# Altium schematic symbol library BQ24040DSQR.SchLib: 1 symbol
Pins are listed as number, name and electrical type; pins without a type are passive.

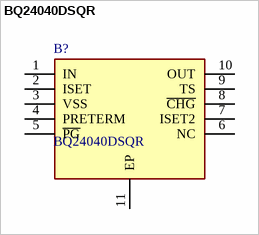
[diagram p0: symbol BQ24040DSQR]

## BQ24040DSQR
designator B?
1A Single-Input, Single Cell Li-Ion Battery Charger. Vovp=6.6V | Linear; Manufacturer_Name: Texas Instruments; Geometry.Height: 0.8mm; Mouser Part Number: 595-BQ24040DSQR; Mouser Price/Stock: https://www.mouser.co.uk/ProductDetail/Texas-Instruments/BQ24040DSQR?qs=c7TMWs5treTJYvOlVMq%252B%2Fw%3D%3D; Manufacturer_Part_Number: BQ24040DSQR; Datasheet Link: http://www.ti.com/lit/gpn/bq24040
footprint SON40P200X200X80-11N
pins: 1 IN, 2 ISET, 3 VSS, 4 PRETERM, 5 ~{PG}, 6 NC, 7 ISET2, 8 ~{CHG}, 9 TS, 10 OUT, 11 EP